# Altium schematic symbol library ThreeSymbols.SchLib: 3 symbols
Pins are listed as number, name and electrical type; pins without a type are passive.

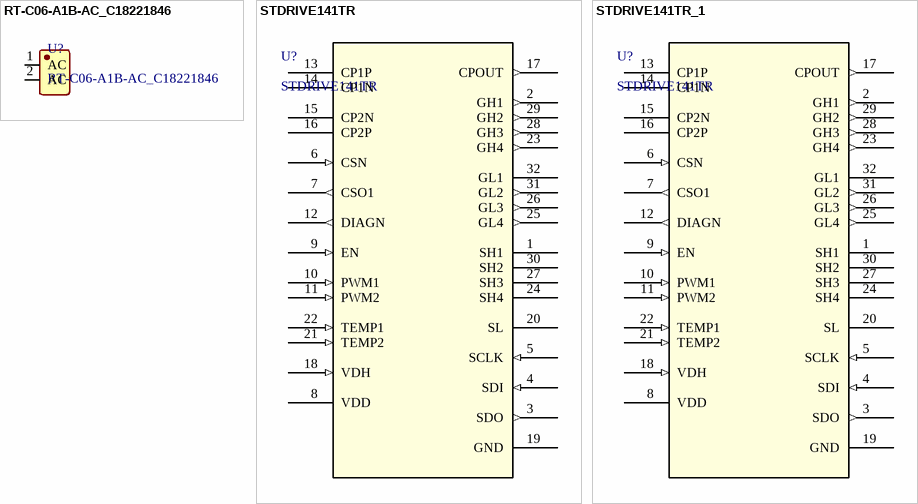
[diagram p0: symbols RT-C06-A1B-AC_C18221846 to STDRIVE141TR_1]

## RT-C06-A1B-AC_C18221846
designator U?
Legion(六钧) RT-C06-A1B-AC; Manufacturer: Legion(六钧); Manufacturer Part Number: RT-C06-A1B-AC; Supplier: LCSC; JLCPCB Part Number: C18221846; Package: AC-IN-TH_RT-C06-A1B-AC; JLCPCB Part Class: Extended Part
footprint AC-IN-TH_RT-C06-A1B-AC (EasyEDA footprint)
pins: 1 AC, 2 AC

## STDRIVE141TR
designator U?
integration test; Manufacturer_Name: STMicroelectronics; Manufacturer: TEST-MFR; Copyright: Copyright (C) 2026 Ultra Librarian. All rights reserved.; Manufacturer_Part_Number: STDRIVE141TR; Datasheet: https://example.com/test.pdf; RefDes: RefDes; Type: Type; Manufacturer Part Number: STDRIVE141TR
footprint VFQFN32-5x5_STM
pins: 1 SH1, 2 GH1 (out), 3 SDO (out), 4 SDI (in), 5 SCLK (in), 6 CSN (in), 7 CSO1 (out), 8 VDD (power), 9 EN (in), 10 PWM1 (in), 11 PWM2 (in), 12 DIAGN (out), 13 CP1P, 14 CP1N, 15 CP2N, 16 CP2P, 17 CPOUT (out), 18 VDH (in), 19 GND (power), 20 SL, 21 TEMP2 (in), 22 TEMP1 (in), 23 GH4 (out), 24 SH4, 25 GL4 (out), 26 GL3 (out), 27 SH3, 28 GH3 (out), 29 GH2 (out), 30 SH2, 31 GL2 (out), 32 GL1

## STDRIVE141TR_1
designator U?, comment STDRIVE141TR
integration test; Manufacturer_Name: STMicroelectronics; Manufacturer: TEST-MFR; Copyright: Copyright (C) 2026 Ultra Librarian. All rights reserved.; Manufacturer_Part_Number: STDRIVE141TR; Datasheet: https://example.com/test.pdf; RefDes: RefDes; Type: Type; Manufacturer Part Number: STDRIVE141TR
footprint VFQFN32-5x5_STM_1
pins: 1 SH1, 2 GH1 (out), 3 SDO (out), 4 SDI (in), 5 SCLK (in), 6 CSN (in), 7 CSO1 (out), 8 VDD (power), 9 EN (in), 10 PWM1 (in), 11 PWM2 (in), 12 DIAGN (out), 13 CP1P, 14 CP1N, 15 CP2N, 16 CP2P, 17 CPOUT (out), 18 VDH (in), 19 GND (power), 20 SL, 21 TEMP2 (in), 22 TEMP1 (in), 23 GH4 (out), 24 SH4, 25 GL4 (out), 26 GL3 (out), 27 SH3, 28 GH3 (out), 29 GH2 (out), 30 SH2, 31 GL2 (out), 32 GL1